# Altium integrated library Programmer_Board.IntLib: 5 symbols
Pins are listed as number, name and electrical type; pins without a type are passive.

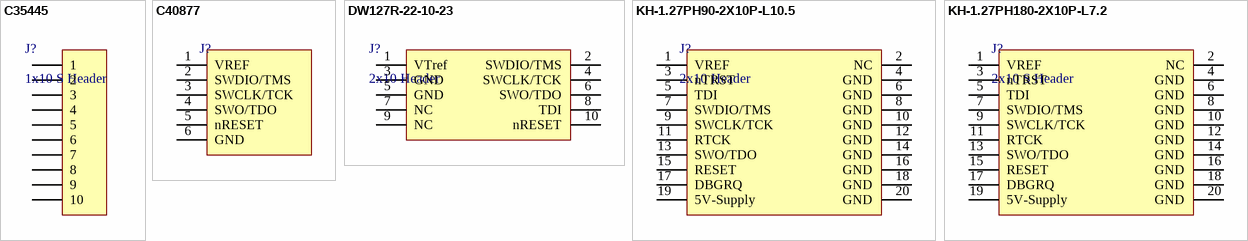
[diagram p0: symbols C35445 to KH-1.27PH180-2X10P-L7.2]

## C35445
designator J?, comment 1x10 S Header
2.54mm Straight 1x10P 10 1 Straight,P=2.54mm Female Headers ROHS /; Manufacturer: BOOMELE; Manufacturer Part Number: C35445; LCSC Part Number: C35445; ComponentLink1Description: LCSC; ComponentLink1URL: https://lcsc.com/product-detail/span-style-background-color-ff0-Female-span-Headers_BOOMELE-Boom-Precision-Elec-C35445_C35445.html
footprint HDR1X10 Straight
pins: 1, 2, 3, 4, 5, 6, 7, 8, 9, 10

## C40877
designator J?
2.54mm Straight 1x6P 6 1 Straight,P=2.54mm Female Headers ROHS; Manufacturer: BOOMELE; Manufacturer Part Number: C40877; LCSC Part Number: C40877; ComponentLink1Description: LCSC; ComponentLink1URL: https://lcsc.com/product-detail/span-style-background-color-ff0-Female-span-Headers_BOOMELE-Boom-Precision-Elec-C40877_C40877.html
footprint HDR_F_1X6
pins: 1 VREF, 2 SWDIO/TMS, 3 SWCLK/TCK, 4 SWO/TDO, 5 nRESET, 6 GND

## DW127R-22-10-23
designator J?, comment 2x10 Header
1A Straight Square Pins 1mm 3mm 2 10 2.3mm 1.27mm 1.27mm 2x5P Straight,P=1.27mm Pin Headers ROHS /; Manufacturer: DEALON; Manufacturer Part Number: DW127R-22-10-23; Package: Custom; LCSC Part Number: C2935953; ComponentLink1Description: LCSC; ComponentLink1URL: https://lcsc.com/product-detail/span-style-background-color-ff0-Pin-span-Headers_DEALON-DW127R-22-10-23_C2935953.html
footprint 10Pin 1.27mm (Male header 1.27mm 5x2 10-Pin)
pins: 1 VTref, 2 SWDIO/TMS, 3 GND, 4 SWCLK/TCK, 5 GND, 6 SWO/TDO, 7 NC, 8 TDI, 9 NC, 10 nRESET

## KH-1.27PH90-2X10P-L10.5
designator J?, comment 2x10 Header
1A Shrouded Square Pins 1mm 4mm 2 -40℃~+105℃ 20 1.27mm 2x10P Push-Pull,P=1.27mm Pin Headers ROHS; Manufacturer: Shenzhen Kinghelm; Manufacturer Part Number: KH-1.27PH90-2X10P-L10.5; Package: Custom; ComponentLink1Description: LCSC; ComponentLink1URL: https://lcsc.com/product-detail/span-style-background-color-ff0-Pin-span-Headers_Shenzhen-Kinghelm-Elec-KH-1-27PH90-2X10P-L10-5_C2938429.html; LCSC Part Number: C2938429
footprint HDR2X10H (1.27mm) (Connector; Header; 10x2 Position; Right Angle)
pins: 1 VREF, 2 NC, 3 nTRST, 4 GND, 5 TDI, 6 GND, 7 SWDIO/TMS, 8 GND, 9 SWCLK/TCK, 10 GND, 11 RTCK, 12 GND, 13 SWO/TDO, 14 GND, 15 RESET, 16 GND, 17 DBGRQ, 18 GND, 19 5V-Supply, 20 GND

## KH-1.27PH180-2X10P-L7.2
designator J?, comment 2x10 S Header
1A Straight Square Pins 1mm 3.9mm 2 -40℃~+105℃ 20 2.3mm 1.27mm 1.27mm 2x10P Straight,P=1.27mm Pin Headers ROHS; Manufacturer: Shenzhen Kinghelm; Manufacturer Part Number: KH-1.27PH180-2X10P-L7.2; LCSC Part Number: C2938414; ComponentLink1Description: LCSC; ComponentLink1URL: https://lcsc.com/product-detail/span-style-background-color-ff0-Pin-span-Headers_Shenzhen-Kinghelm-Elec-KH-1-27PH180-2X10P-L7-2_C2938414.html
footprint HDR2x10 Straight (1.27mm)
pins: 1 VREF, 2 NC, 3 nTRST, 4 GND, 5 TDI, 6 GND, 7 SWDIO/TMS, 8 GND, 9 SWCLK/TCK, 10 GND, 11 RTCK, 12 GND, 13 SWO/TDO, 14 GND, 15 RESET, 16 GND, 17 DBGRQ, 18 GND, 19 5V-Supply, 20 GND